# Altium schematic symbol library BM10B-SRSS-TB_LF__SN_.SchLib: 1 symbol
Pins are listed as number, name and electrical type; pins without a type are passive.

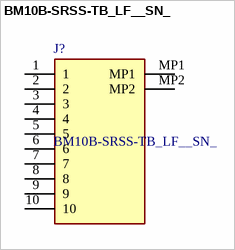
[diagram p0: symbol BM10B-SRSS-TB_LF__SN_]

## BM10B-SRSS-TB_LF__SN_
designator J?
Pin Header, Top Entry, Wire-to-Board, 1 mm, 1 Rows, 10 Contacts, Surface Mount, SR; Manufacturer_Name: JST (JAPAN SOLDERLESS TERMINALS); Manufacturer_Part_Number: BM10B-SRSS-TB(LF)(SN); Geometry.Height: 6.3mm; Mouser Part Number: N/A; Mouser Price/Stock: https://www.mouser.co.uk/ProductDetail/JST-Commercial/BM10B-SRSS-TBLFSN?qs=QpmGXVUTftHkAAIgDl8JVg%3D%3D; Arrow Part Number: BM10B-SRSS-TB(LF)(SN); Arrow Price/Stock: https://www.arrow.com/en/products/bm10b-srss-tb-lf-sn/jst-manufacturing?utm_currency=USD&region=europe; Datasheet Link: https://www.jst-mfg.com/product/pdf/eng/eSH.pdf
footprint BM10BSRSSTBLFSN
pins: 1, 2, 3, 4, 5, 6, 7, 8, 9, 10, MP1, MP2